# Altium footprint library 5024940270.PcbLib: 1 footprints
Each footprint in its own frame and in the unit in brackets; x right, y up, seen from the top. Pads: shape width x height; smd on the part's side, far side on the other; paste and mask are expansions set on the pad; w line width, h text height; cw(c..) or ccw(c..) is an arc to the next point about the centre after c.
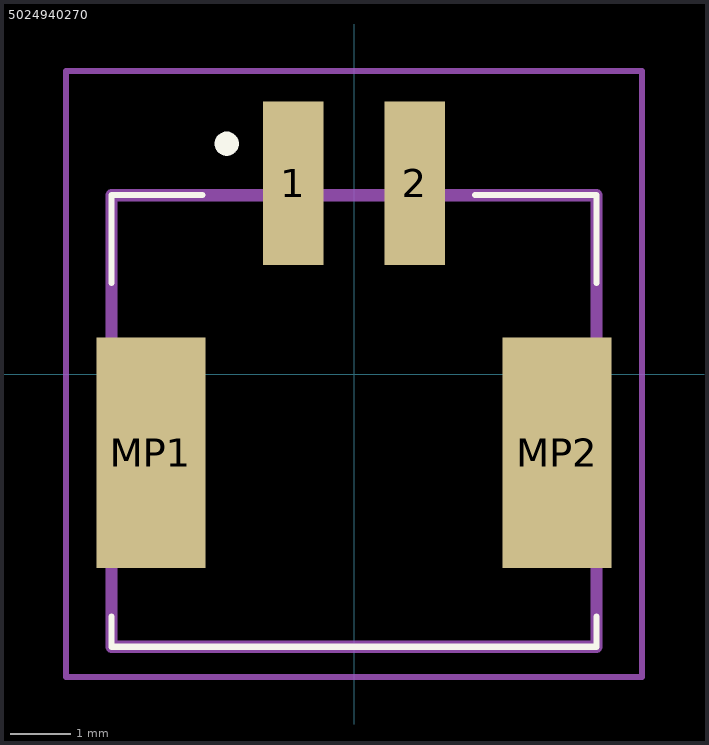
[diagram p0: the footprint, top view; thin cyan lines are the x and y axes]

## 5024940270 [mm]
pads (4):
  rect 1x2.7 smd: 1(-1,3.15) 2(1,3.15)
  rect 1.8x3.8 smd: MP1(-3.35,-1.3) MP2(3.35,-1.3)
Top Overlay:
  lines w0.1: -4,-4 -4,-4.5 4,-4.5 4,-4 ; -4,1.5 -4,2.95 -2.5,2.95 ; 2,2.95 4,2.95 4,1.5
  lines w0.2: -2.1,3.7 cw(c-2.1,3.8) -2.1,3.9 ; -2.1,3.7 -2.1,3.7 ; -2.1,3.7 ccw(c-2.1,3.8) -2.1,3.9 ; -2.1,3.9 -2.1,3.9
Mechanical 15:
  lines w0.2: -4,-4.5 4,-4.5 4,2.95 -4,2.95 -4,-4.5
Mechanical 20:
  lines w0.1: -4.75,-5 4.75,-5 4.75,5 -4.75,5 -4.75,-5